# Altium schematic symbol library WS2812.SCHLIB: 2 symbols
Pins are listed as number, name and electrical type; pins without a type are passive.

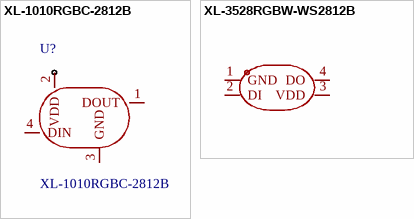
[diagram p0: symbols XL-1010RGBC-2812B to XL-3528RGBW-WS2812B]

## XL-1010RGBC-2812B
designator U?
Manufacturer: XINGLIGHT(成兴光); Symbol: XL-1010RGBC-WS2812B; Add into BOM: yes; Wavelength: 620nm~625nm；465nm~475nm；520nm~530nm; Luminous Intensity: 300mcd；800mcd；200mcd; Fixed-Frequency Pwm Mode: 1kHz; Data Transmission Rate: 800Kbit/s; Voltage - Supply: 4.5V~5.5V; Quiescent Current: 0.35mA; Lens Color: 无色透明透镜; ESD Withstand Voltage: 2000V; Installation method: 正贴; Peak Wavelength: R:625nm；B:470nm；G:525nm; Viewing Angle: 120°; Device: XL-1010RGBC-2812B; LCSC Part Name: XL-1010RGBC-WS2812B; Supplier Part: C5349953; Manufacturer Part: XL-1010RGBC-2812B; Supplier Footprint: SMD,1x1mm; JLCPCB Part Class: 扩展库; Datasheet: https://item.szlcsc.com/datasheet/XL-1010RGBC-2812B/6136402.html; Supplier: LCSC; Convert to PCB: yes; Operating Temperature: -20℃~+85℃; Length: 1mm; Width: 0.8mm; Height: 1mm
footprint LED-SMD_4P-L1.0-W1.0-TL_XL-1010RGBC-WS2812B
3D model LED-SMD_4P-L1.0-W1.0-TL_XL-1010RGBC-WS2812B
pins: 1 DOUT, 2 VDD, 3 GND, 4 DIN

## XL-3528RGBW-WS2812B
designator WS??
Symbol: XL-3528RGBW-WS2812B
footprint LED-SMD_4P-L3.5-W2.8-BR-1
pins: 1 GND, 2 DI, 3 VDD, 4 DO